# Altium schematic symbol library TPS79650DRBR.SchLib: 1 symbol
Pins are listed as number, name and electrical type; pins without a type are passive.

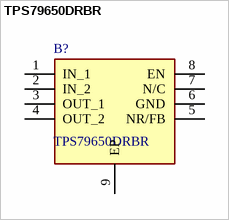
[diagram p0: symbol TPS79650DRBR]

## TPS79650DRBR
designator B?
Ultralow-Noise, High PSRR, Fast, RF, 1-A Low-Dropout Linear Regulators; Manufacturer_Name: Texas Instruments; Geometry.Height: 1mm; Mouser Part Number: 595-TPS79650DRBR; Mouser Price/Stock: https://www.mouser.co.uk/ProductDetail/Texas-Instruments/TPS79650DRBR?qs=7kv20MEVUlgJJlUqLWKaLg%3D%3D; Manufacturer_Part_Number: TPS79650DRBR; Datasheet Link: http://www.ti.com/lit/gpn/tps796
footprint SON65P300X300X100-9N-D
pins: 1 IN_1, 2 IN_2, 3 OUT_1, 4 OUT_2, 5 NR/FB, 6 GND, 7 N/C, 8 EN, 9 EP